# Altium footprint library LED0603.PcbLib: 1 footprints
Each footprint in its own frame and in the unit in brackets; x right, y up, seen from the top. Pads: shape width x height; smd on the part's side, far side on the other; paste and mask are expansions set on the pad; w line width, h text height; cw(c..) or ccw(c..) is an arc to the next point about the centre after c.
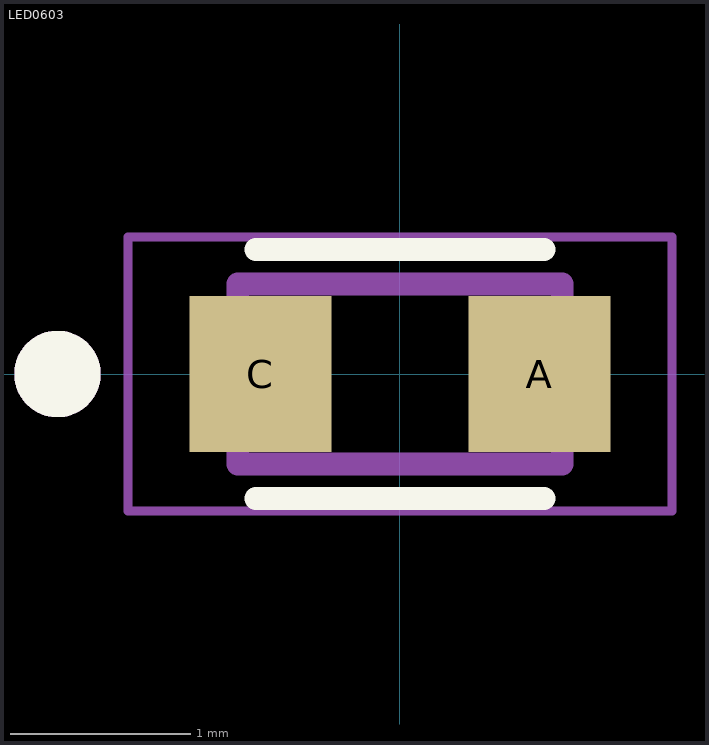
[diagram p0: the footprint, top view; thin cyan lines are the x and y axes]

## LED0603 [mil] "LEDC1608X65N"
pads (2):
  rect 31x34 smd: A(30.5,0) C(-30.5,0)
Top Overlay:
  circle w9.45: c-74.8,0 r4.72
  lines w5: -31.5,-27.17 31.5,-27.17 ; -31.5,27.17 31.5,27.17
Mechanical 13:
  circle w9.45: c-74.8,0 r4.72
  lines w5: -35.43,-19.68 -35.43,19.68 35.43,19.68 35.43,-19.68 -35.43,-19.68
Mechanical 15:
  lines w1.97: -59.45,-29.92 -59.45,29.92 59.45,29.92 59.45,-29.92 -59.45,-29.92
3D body "LED0603_RED.step": height 35.43, standoff 0, extent -33.46,-17.72 33.46,17.72